# Altium footprint library Connector-USB.PcbLib: 42 footprints (part 3 of 3)
Each footprint in its own frame and in the unit in brackets; x right, y up, seen from the top. Pads: shape width x height; smd on the part's side, far side on the other; paste and mask are expansions set on the pad; w line width, h text height; cw(c..) or ccw(c..) is an arc to the next point about the centre after c.
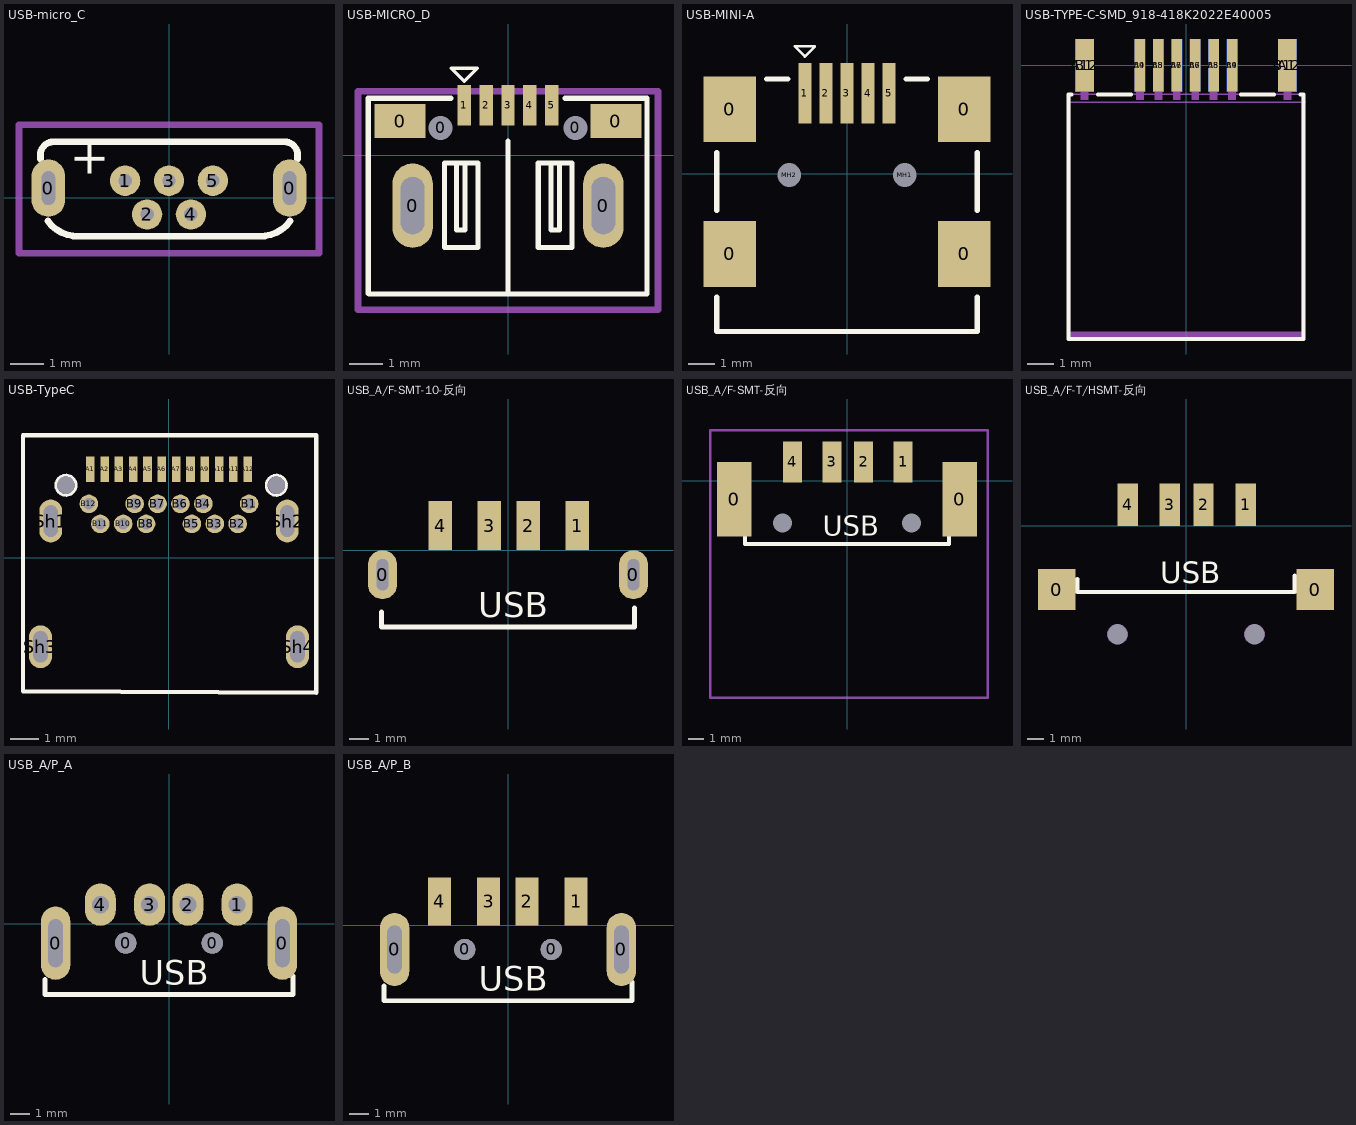
[diagram p2: the footprints below, top view; thin cyan lines are the x and y axes]

## USB-micro_C [mm]
pads (7):
  oval 1x1.7 hole 0.4 slot 1 at 90 deg: 0(-3.575,0.28) 0(3.575,0.28)
  round 0.9 hole 0.4: 1(-1.3,0.5) 2(-0.65,-0.5) 3(0,0.5) 4(0.65,-0.5) 5(1.3,0.5)
Top Overlay:
  lines w0.2: -3.81,1.143 -3.81,1.27 cw(c-3.429,1.27) -3.429,1.651 -3.175,1.651 -2.794,1.651 2.794,1.651 3.175,1.651 3.429,1.651 cw(c3.429,1.27) 3.81,1.27 3.81,1.143 ; -3.587,-0.697 ccw(c-2.718,-0.076) -2.667,-1.143 ; -2.629,-1.143 -2.413,-1.143 2.413,-1.143 2.667,-1.143 ccw(c2.718,-0.076) 3.587,-0.697
  text "+" at -1.905,0.559 h1.02
Top Value:
  text "'.Comment'" at -4.314,-0.581 h2
Top Designator:
  text "'.Designator'" at -5.721,-0.419 h2
Top Courtyard:
  lines w0.2: -4.445,-1.651 4.445,-1.651 4.445,2.159 -4.445,2.159 -4.445,-1.651
3D body "USB-MICRO_C.STEP": height 5.65, standoff -1.55, extent -3.968,-1.241 4.034,1.733

## USB-MICRO_D [mm]
pads (11):
  rect 1.5x1 smd: 0(-3.2,1.019) 0(3.2,1.019)
  oval 1.2x2.5 hole 0.7 slot 1.7 at 90 deg: 0(-2.825,-1.486) 0(2.825,-1.486)
  round 0.6 hole 0.7 unplated: 0(-2,0.814) 0(2,0.814)
  rect 0.4x1.2 smd: 1(-1.295,1.486) 2(-0.648,1.486) 3(0,1.486) 4(0.648,1.486) 5(1.295,1.486)
Top Overlay:
  lines w0.1: -1.676,2.583 -1.295,2.202 -0.914,2.583 -1.676,2.583
  lines w0.15: -4.14,1.694 -1.689,1.694 ; 0,-4.11 0,0.424 ; 1.689,1.694 4.115,1.694
  lines w0.152: -4.14,-4.084 -4.14,1.694 ; -4.115,-4.11 4.089,-4.11 ; -1.524,-0.224 -1.524,-2.209 -1.321,-2.209 -1.27,-2.209 -1.27,-0.224 ; 1.27,-0.224 1.27,-2.209 1.524,-2.209 1.524,-0.224 ; 4.115,-4.11 4.115,1.694 ; -1.885,-2.724 -0.885,-2.724 -0.885,-0.224 -1.885,-0.224 -1.885,-2.724 ; 0.896,-2.724 0.896,-0.224 1.896,-0.224 1.896,-2.724 0.896,-2.724
Top Value:
  text "'.Comment'" at -4.314,-0.581 h2
Top Designator:
  text "'.Designator'" at -5.721,-0.419 h2
Top Courtyard:
  lines w0.2: -4.445,-4.572 -4.445,1.905 4.445,1.905 4.445,-4.572 -4.445,-4.572
3D body "USB-MICRO_D.STEP": height 2.8, standoff -1.35, extent -4.027,-4.16 3.976,1.44

## USB-MINI-A [mm]
pads (11):
  rect 2x2.5 smd: 0(-4.45,-3.054) 0(-4.45,2.446) 0(4.45,-3.054) 0(4.45,2.446)
  rect 0.5x2.3 smd: 1(-1.6,3.054) 2(-0.8,3.054) 3(0,3.054) 4(0.8,3.054) 5(1.6,3.054)
  round 0.6 hole 0.9 unplated: MH1(2.2,-0.054) MH2(-2.2,-0.054)
Top Overlay:
  lines w0.1: -1.981,4.832 -1.6,4.451 -1.219,4.832 -1.981,4.832
  lines w0.2: -4.95,-4.704 -4.95,-6.004 4.95,-6.004 4.95,-4.704 ; -4.95,-1.404 -4.95,0.796 ; -3.05,3.596 -2.25,3.596 ; 2.25,3.596 3.05,3.596 ; 4.95,-1.404 4.95,0.796
Top Value:
  text "'.Comment'" at -4.314,-0.581 h2
Top Designator:
  text "'.Designator'" at -5.721,-0.419 h2
3D body "USB-MINI-A.STEP": height 3.95, standoff -0.7, extent -4.775,-5.987 4.725,3.713

## USB-TYPE-C-SMD_918-418K2022E40005 [mm]
pads (16):
  rect 0.7x2 smd far side: A1(3.85,0) A12(-3.85,0)
  rect 0.4x2 smd far side: A4(1.75,0) A5(1.05,0) A6(0.35,0) A7(-0.35,0) A8(-1.049,0) A9(-1.75,0)
  rect 0.7x2 smd: B1(-3.85,0) B12(3.85,0)
  rect 0.4x2 smd: B4(-1.75,0) B5(-1.05,0) B6(-0.35,0) B7(0.35,0) B8(1.05,0) B9(1.75,0)
Top Overlay:
  lines w0.152: -4.349,-1.1 -4.47,-1.1 -4.47,-10.4 4.47,-10.4 4.47,-1.1 4.349,-1.1 ; -3.351,-1.1 -2.099,-1.1 ; 2.099,-1.1 3.351,-1.1
Top Component Center:
  region: 4.47,-1.1 4.47,-10.4 -4.47,-10.4 -4.47,-1.1 -4.39,-1.1 -4.39,-10.12 4.39,-10.12 4.39,-1.1
Bottom Courtyard:
  drawing of 33 lines, arcs and shapes, not listed

## USB-TypeC [mm]
pads (30):
  round 0 hole 0.6 unplated: 0(-3.6,2.54) 0(3.75,2.54)
  rect 0.3x0.9 smd: A1(-2.75,3.1) A2(-2.25,3.1) A3(-1.75,3.1) A4(-1.25,3.1) A5(-0.75,3.1) A6(-0.25,3.1) A7(0.25,3.1) A8(0.75,3.1) A9(1.25,3.1) A10(1.75,3.1) A11(2.25,3.1) A12(2.75,3.1)
  round 0.65 hole 0.4: B1(2.8,1.89) B2(2.4,1.19) B3(1.6,1.19) B4(1.2,1.89) B5(0.8,1.19) B6(0.4,1.89) B7(-0.4,1.89) B8(-0.8,1.19) B9(-1.2,1.89) B10(-1.6,1.19) B11(-2.4,1.19) B12(-2.8,1.89)
  oval 0.8x1.5 hole 1.1 slot 0.5 at 0 deg: Sh1(-4.13,1.29) Sh2(4.13,1.29) Sh3(-4.49,-3.1) Sh4(4.49,-3.1)
Top Overlay:
  circle w0.1: c-3.6,2.54 r0.354
  circle w0.1: c3.75,2.54 r0.354
  lines w0.152: -5.1,-4.66 5.15,-4.71 5.15,4.29 -5.1,4.29 -5.1,-4.66
Keep-Out Layer:
  board cut-out: 3.425,2.54 3.425,2.475 3.474,2.356 3.566,2.264 3.685,2.215 3.75,2.215 3.815,2.215 3.934,2.264 4.026,2.356 4.075,2.475 4.075,2.54 4.075,2.604 4.026,2.724 3.934,2.815 3.815,2.865 3.75,2.865 3.685,2.865 3.566,2.815 3.474,2.724 3.425,2.604
  board cut-out: -3.6,2.215 -3.665,2.215 -3.784,2.265 -3.876,2.356 -3.925,2.476 -3.925,2.54 -3.925,2.605 -3.876,2.724 -3.784,2.816 -3.665,2.865 -3.6,2.865 -3.535,2.865 -3.416,2.816 -3.324,2.724 -3.275,2.605 -3.275,2.54 -3.275,2.476 -3.324,2.356 -3.416,2.265 -3.535,2.215
Top Value:
  text "'.Comment'" at -4.314,-0.581 h2
Top Designator:
  text "'.Designator'" at -5.721,-0.419 h2
3D body "USB-C.stp": height 3.17, standoff -1.02, extent -4.825,-4.56 4.825,4.14

## USB_A/F-SMT-10-反向 [mm] "反向"
height 1.75
pads (6):
  oval 1.5x2.5 hole 0.6 slot 1.6 at 90 deg: 0(-6.4,-1.254) 0(6.4,-1.254)
  rect 1.2x2.5 smd: 1(3.543,1.254) 2(1.043,1.254) 3(-0.957,1.254) 4(-3.457,1.254)
Top Overlay:
  lines w0.254: -6.45,-3.154 -6.45,-3.921 6.45,-3.921 6.45,-2.954
  text "USB" at -1.524,-3.413 h1.27
Top Value:
  text "'.Comment'" at -4.316,-4.137 h2
Top Designator:
  text "'.Designator'" at -5.723,-3.975 h2
3D body "c-1-292303-1-e-3d.stp": height 8.62, standoff -2.74, extent -8.117,-12.93 8.115,2.23

## USB_A/F-SMT-反向 [mm] "反向"
height 7.8
pads (8):
  rect 2.2x4.7 smd: 0(-7.125,-1.175) 0(7.125,-1.175)
  rect 1.2x2.6 smd: 1(3.543,1.175) 2(1.043,1.175) 3(-0.957,1.175) 4(-3.457,1.175)
  round 0 hole 1.2 unplated: 25(-4.064,-2.667) 26(4.064,-2.667)
Top Overlay:
  lines w0.254: -6.45,-3.233 -6.45,-4 6.45,-4 6.45,-3.033
  text "USB" at -1.524,-3.492 h1.27
Top Value:
  text "'.Comment'" at -4.308,-6.042 h2
Top Designator:
  text "'.Designator'" at -5.715,-5.88 h2
Bottom Courtyard:
  lines w0.15: -8.636,-13.716 -8.636,3.175 -8,3.175 8,3.175 8.89,3.175 8.89,-13.716 -8.636,-13.716
  text "'.Designator'" at -6.469,-6.889 h2.03
3D body "c-292303-9-e-3d.stp": height 7.81, standoff -0.98, extent -8.624,-13.628 8.636,1.532

## USB_A/F-T/HSMT-反向 [mm] "反向"
height 1.75
pads (8):
  rect 2.22x2.44 smd: 0(-7.67,-3.78) 0(7.67,-3.78)
  rect 1.2x2.5 smd: 1(3.543,1.254) 2(1.043,1.254) 3(-0.957,1.254) 4(-3.457,1.254)
  round 0 hole 1.2 unplated: 25(-4.06,-6.426) 25(4.06,-6.426)
Top Overlay:
  lines w0.254: -6.45,-3.154 -6.45,-3.921 6.45,-3.921 6.45,-2.954
  text "USB" at -1.524,-3.413 h1.27
Keep-Out Layer:
  board cut-out: -4.66,-6.426 -4.66,-6.545 -4.569,-6.766 -4.4,-6.935 -4.179,-7.026 -4.06,-7.026 -3.941,-7.026 -3.72,-6.935 -3.551,-6.766 -3.46,-6.545 -3.46,-6.426 -3.46,-6.307 -3.551,-6.086 -3.72,-5.917 -3.941,-5.826 -4.06,-5.826 -4.179,-5.826 -4.4,-5.917 -4.569,-6.086 -4.66,-6.307
  board cut-out: 3.46,-6.426 3.46,-6.545 3.551,-6.766 3.72,-6.935 3.94,-7.026 4.06,-7.026 4.179,-7.026 4.4,-6.935 4.568,-6.766 4.66,-6.545 4.66,-6.426 4.66,-6.307 4.568,-6.086 4.4,-5.917 4.179,-5.826 4.06,-5.826 3.94,-5.826 3.72,-5.917 3.551,-6.086 3.46,-6.307
  board cut-out: -4.66,-6.426 -4.66,-6.545 -4.569,-6.766 -4.4,-6.935 -4.179,-7.026 -4.06,-7.026 -3.941,-7.026 -3.72,-6.935 -3.551,-6.766 -3.46,-6.545 -3.46,-6.426 -3.46,-6.307 -3.551,-6.086 -3.72,-5.917 -3.941,-5.826 -4.06,-5.826 -4.179,-5.826 -4.4,-5.917 -4.569,-6.086 -4.66,-6.307
Top Value:
  text "'.Comment'" at -4.314,-4.361 h2
Top Designator:
  text "'.Designator'" at -5.721,-4.199 h2
3D body "c-292303-9-e-3d.stp": height 7.81, standoff -0.98, extent -8.624,-13.549 8.636,1.611

## USB_A/P_A [mm]
height 1.75
pads (8):
  oval 1.524x3.81 hole 0.762 slot 2.5 at 90 deg: 0(-5.9,-1) 0(5.9,-1)
  round 1.1 hole 1.1: 0(-2.25,-1) 0(2.25,-1)
  oval 1.6x2.2 hole 0.9: 1(3.543,1) 2(0.987,1) 3(-1.013,1) 4(-3.569,1)
Top Overlay:
  lines w0.254: -6.45,-2.9 -6.45,-3.667 6.45,-3.667 6.45,-2.7
  text "USB" at -1.524,-3.159 h1.27
Top Value:
  text "'.Comment'" at -4.331,-4.518 h2
Top Designator:
  text "'.Designator'" at -5.737,-4.356 h2
3D body "USB_A_P-A.STEP": height 3.25, standoff -2.52, extent -6.49,-18.909 6.457,1.097

## USB_A/P_B [mm]
height 1.75
pads (8):
  oval 1.524x3.81 hole 0.762 slot 2.5 at 90 deg: 0(-5.9,-1.254) 0(5.9,-1.254)
  round 1.1 hole 1.1: 0(-2.25,-1.254) 0(2.25,-1.254)
  rect 1.2x2.5 smd: 1(3.543,1.254) 2(0.987,1.254) 3(-1.013,1.254) 4(-3.569,1.254)
Top Overlay:
  lines w0.254: -6.45,-3.154 -6.45,-3.921 6.45,-3.921 6.45,-2.954
  text "USB" at -1.524,-3.413 h1.27
Top Value:
  text "'.Comment'" at -4.314,-5.534 h2
Top Designator:
  text "'.Designator'" at -5.721,-5.372 h2
3D body "USB_A_P-B.STEP": height 3.25, standoff -2.52, extent -6.363,-19.206 6.584,1.394